# Altium schematic symbol library Logic_ICs.SchLib: 3 symbols
Pins are listed as number, name and electrical type; pins without a type are passive.

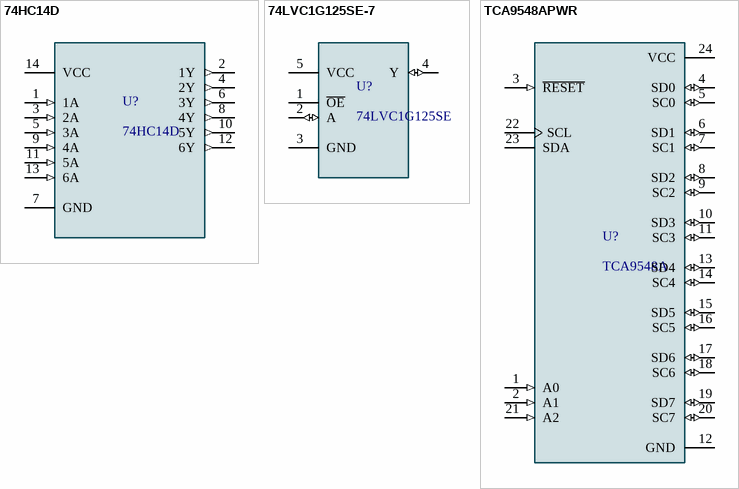
[diagram p0: symbols 74HC14D to TCA9548APWR]

## 74HC14D
designator U?
Inverter IC 6 Channel Schmitt Trigger 14-SOIC; MF: Toshiba; SnapEDA_Link: https://www.snapeda.com/parts/74HC14D/Toshiba/view-part/?ref=snap; Package: SO14-14 Nexperia USA Inc.; Value: *; MP: 74HC14D; Check_prices: https://www.snapeda.com/parts/74HC14D/Toshiba/view-part/?ref=eda
footprint 74HC14D (SOIC127P600X175-14N)
pins: 1 1A (in), 2 1Y (out), 3 2A (in), 4 2Y (out), 5 3A (in), 6 3Y (out), 7 GND, 8 4Y (out), 9 4A (in), 10 5Y (out), 11 5A (in), 12 6Y (out), 13 6A (in), 14 VCC (power)

## 74LVC1G125SE-7
designator U?, comment 74LVC1G125SE
Buffer/Line Driver CMOS 5Pin SOT353 | Diodes Inc 74LVC1G125SE-7; MF: Diodes Inc.; SnapEDA_Link: https://www.snapeda.com/parts/74LVC1G125SE-7/Diodes+Inc./view-part/?ref=snap; Package: SOT-353 Diodes Inc.; Value: *; MP: 74LVC1G125SE-7; Check_prices: https://www.snapeda.com/parts/74LVC1G125SE-7/Diodes+Inc./view-part/?ref=eda
footprint 74LVC1G125SE-7 (SOT65P210X110-5N / (SOT-353))
pins: 1 ~{OE} (power), 2 A (io), 3 GND, 4 Y (io), 5 VCC (power)

## TCA9548APWR
designator U?, comment TCA9548A
8-channel 1.65- to 5.5-V I2C/SMBus switch with reset & voltage translation; MF: Texas Instruments; MP: TCA9548APWR; SnapEDA_Link: https://www.snapeda.com/parts/TCA9548APWR/Texas+Instruments/view-part/?ref=snap; Package: TSSOP-24 Texas Instruments; Value: *; Check_prices: https://www.snapeda.com/parts/TCA9548APWR/Texas+Instruments/view-part/?ref=eda
footprint TCA9548APWR (SOP65P640X120-24N)
pins: 1 A0 (in), 2 A1 (in), 3 ~{RESET} (in), 4 SD0 (io), 5 SC0 (io), 6 SD1 (io), 7 SC1 (io), 8 SD2 (io), 9 SC2 (io), 10 SD3 (io), 11 SC3 (io), 12 GND (power), 13 SD4 (io), 14 SC4 (io), 15 SD5 (io), 16 SC5 (io), 17 SD6 (io), 18 SC6 (io), 19 SD7 (io), 20 SC7 (io), 21 A2 (in), 22 SCL (power), 23 SDA (power), 24 VCC (power)